# Altium schematic symbol library R_20.SchLib: 1 symbol
Pins are listed as number, name and electrical type; pins without a type are passive.

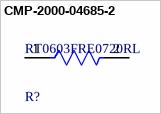
[diagram p0: symbol CMP-2000-04685-2]

## CMP-2000-04685-2
designator R?, comment RT0603FRE0720RL
RES SMD 20 OHM 1% 1/10W 0603; Manufacturer: Yageo; Temperature Coefficient: 50 ppm/°C; Power Rating: 0.1W; Tolerance: 0.01; Voltage Rating: 75V; Value: 20Ω; Temperature Range High: +155°C; RoHS: TRUE; Mouser Description: Thin Film Resistors - SMD 1/10W 20 ohm 1% 50ppm; Height: 0.55mm; ComponentLink2URL: http://www.yageo.com/documents/recent/PYu-RT_1-to-0.01_RoHS_L_9.pdf; Manufacturer Part Number: RT0603FRE0720RL; Footprint Url: http://www.yageo.com/exep/pages/download/literatures/PYu-R_Mount_10.pdf; Series: RT; Package: RT0603; ComponentLink2Description: Datasheet; Temperature: -55°C to +155°C; Octopart: https://octopart.com/rt0603fre0720rl-yageo-1374964; Temperature Range Low: -55°C; Lead Free: Yes; Composition: Thin Film; Device Class L2: Resistors; Device Class L1: Passive Components; Device Class L3: Chip SMD Resistors; Digikey Description: RES SMD 20 OHM 1% 1/10W 0603; Resistance: 20Ω; Ipc Land Pattern Name: RESC16080X45; Automotive: No; Category: Res
footprint FP-RT0603-IPC_C
footprint FP-RT0603-MFG
footprint FP-RT0603-IPC_A
footprint FP-RT0603-IPC_B
pins: 1, 2